# Altium footprint library FTP.PcbLib: 207 footprints (part 4 of 13)
Each footprint in its own frame and in the unit in brackets; x right, y up, seen from the top. Pads: shape width x height; smd on the part's side, far side on the other; paste and mask are expansions set on the pad; w line width, h text height; cw(c..) or ccw(c..) is an arc to the next point about the centre after c.
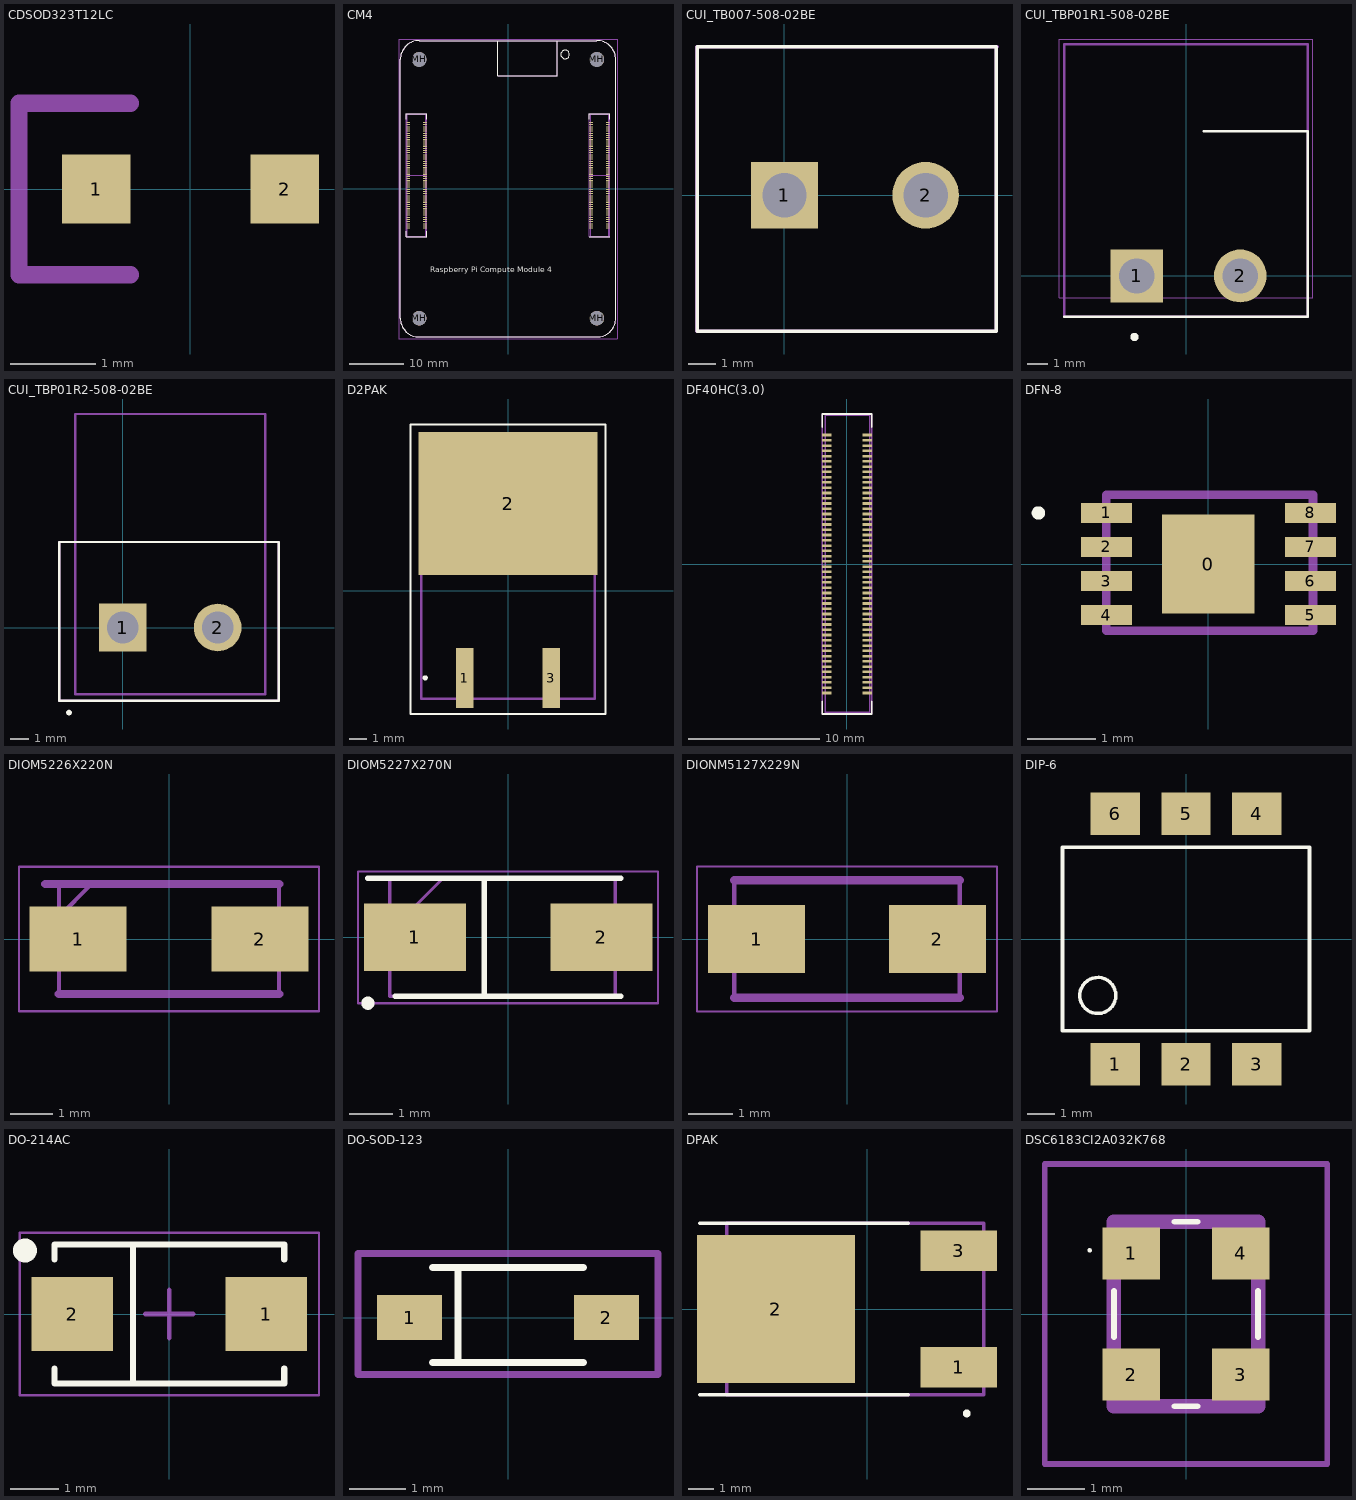
[diagram p3: the footprints below, top view; thin cyan lines are the x and y axes]

## CDSOD323T12LC [mil]
pads (2):
  rect 31.5x31.5 smd: 1(-43.31,0) 2(43.31,0)
Assembly Bottom:
  lines w7.87: -27.56,-39.37 -78.74,-39.37 -78.74,39.37 -27.56,39.37
3D body "CDSOD323-T12LC.stp": height 48.82, standoff 0, extent -55.91,-25.59 55.91,25.59

## CM4 [mm]
pads (204):
  rect 0.7x0.2 smd: 1(18.5,-7.3) 2(15.42,-7.3) 3(18.5,-6.9) 4(15.42,-6.9) 5(18.5,-6.5) 6(15.42,-6.5) 7(18.5,-6.1) 8(15.42,-6.1) 9(18.5,-5.7) 10(15.42,-5.7) 11(18.5,-5.3) 12(15.42,-5.3) 13(18.5,-4.9) 14(15.42,-4.9) 15(18.5,-4.5) 16(15.42,-4.5) 17(18.5,-4.1) 18(15.42,-4.1) 19(18.5,-3.7) 20(15.42,-3.7) 21(18.5,-3.3) 22(15.42,-3.3) 23(18.5,-2.9) 24(15.42,-2.9) 25(18.5,-2.5) 26(15.42,-2.5) 27(18.5,-2.1) 28(15.42,-2.1) 29(18.5,-1.7) 30(15.42,-1.7) 31(18.5,-1.3) 32(15.42,-1.3) 33(18.5,-0.9) 34(15.42,-0.9) 35(18.5,-0.5) 36(15.42,-0.5) 37(18.5,-0.1) 38(15.42,-0.1) 39(18.5,0.3) 40(15.42,0.3) 41(18.5,0.7) 42(15.42,0.7) 43(18.5,1.1) 44(15.42,1.1) 45(18.5,1.5) 46(15.42,1.5) 47(18.5,1.9) 48(15.42,1.9) 49(18.5,2.3) 50(15.42,2.3) 51(18.5,2.7) 52(15.42,2.7) 53(18.5,3.1) 54(15.42,3.1) 55(18.5,3.5) 56(15.42,3.5) 57(18.5,3.9) 58(15.42,3.9) 59(18.5,4.3) 60(15.42,4.3) 61(18.5,4.7) 62(15.42,4.7) 63(18.5,5.1) 64(15.42,5.1) 65(18.5,5.5) 66(15.42,5.5) 67(18.5,5.9) 68(15.42,5.9) 69(18.5,6.3) 70(15.42,6.3) 71(18.5,6.7) 72(15.42,6.7) 73(18.5,7.1) 74(15.42,7.1) 75(18.5,7.5) 76(15.42,7.5) 77(18.5,7.9) 78(15.42,7.9) 79(18.5,8.3) 80(15.42,8.3) 81(18.5,8.7) 82(15.42,8.7) 83(18.5,9.1) 84(15.42,9.1) 85(18.5,9.5) 86(15.42,9.5) 87(18.5,9.9) 88(15.42,9.9) 89(18.5,10.3) 90(15.42,10.3) 91(18.5,10.7) 92(15.42,10.7) 93(18.5,11.1) 94(15.42,11.1) 95(18.5,11.5) 96(15.42,11.5) 97(18.5,11.9) 98(15.42,11.9) 99(18.5,12.3) 100(15.42,12.3) 101(-15.42,-7.3) 102(-18.5,-7.3) 103(-15.42,-6.9) 104(-18.5,-6.9) 105(-15.42,-6.5) 106(-18.5,-6.5) 107(-15.42,-6.1) 108(-18.5,-6.1) 109(-15.42,-5.7) 110(-18.5,-5.7) 111(-15.42,-5.3) 112(-18.5,-5.3) 113(-15.42,-4.9) 114(-18.5,-4.9) 115(-15.42,-4.5) 116(-18.5,-4.5) 117(-15.42,-4.1) 118(-18.5,-4.1) 119(-15.42,-3.7) 120(-18.5,-3.7) 121(-15.42,-3.3) 122(-18.5,-3.3) 123(-15.42,-2.9) 124(-18.5,-2.9) 125(-15.42,-2.5) 126(-18.5,-2.5) 127(-15.42,-2.1) 128(-18.5,-2.1) 129(-15.42,-1.7) 130(-18.5,-1.7) 131(-15.42,-1.3) 132(-18.5,-1.3) 133(-15.42,-0.9) 134(-18.5,-0.9) 135(-15.42,-0.5) 136(-18.5,-0.5) 137(-15.42,-0.1) 138(-18.5,-0.1) 139(-15.42,0.3) 140(-18.5,0.3) 141(-15.42,0.7) 142(-18.5,0.7) 143(-15.42,1.1) 144(-18.5,1.1) 145(-15.42,1.5) 146(-18.5,1.5) 147(-15.42,1.9) 148(-18.5,1.9) 149(-15.42,2.3) 150(-18.5,2.3) 151(-15.42,2.7) 152(-18.5,2.7) 153(-15.42,3.1) 154(-18.5,3.1) 155(-15.42,3.5) 156(-18.5,3.5) 157(-15.42,3.9) 158(-18.5,3.9) 159(-15.42,4.3) 160(-18.5,4.3) 161(-15.42,4.7) 162(-18.5,4.7) 163(-15.42,5.1) 164(-18.5,5.1) 165(-15.42,5.5) 166(-18.5,5.5) 167(-15.42,5.9) 168(-18.5,5.9) 169(-15.42,6.3) 170(-18.5,6.3) 171(-15.42,6.7) 172(-18.5,6.7) 173(-15.42,7.1) 174(-18.5,7.1) 175(-15.42,7.5) 176(-18.5,7.5) 177(-15.42,7.9) 178(-18.5,7.9) 179(-15.42,8.3) 180(-18.5,8.3) 181(-15.42,8.7) 182(-18.5,8.7) 183(-15.42,9.1) 184(-18.5,9.1) 185(-15.42,9.5) 186(-18.5,9.5) 187(-15.42,9.9) 188(-18.5,9.9) 189(-15.42,10.3) 190(-18.5,10.3) 191(-15.42,10.7) 192(-18.5,10.7) 193(-15.42,11.1) 194(-18.5,11.1) 195(-15.42,11.5) 196(-18.5,11.5) 197(-15.42,11.9) 198(-18.5,11.9) 199(-15.42,12.3) 200(-18.5,12.3)
  round 2.7 hole 2.7 paste-2539.97 mask+1.7: MH(-16.5,-24) MH(-16.5,24) MH(16.5,-24) MH(16.5,24)
Top Overlay:
  circle w0.127: c10.6,24.933 r0.8
  lines w0.127: -18.85,-7.9 -18.85,-8.9 -15.07,-8.9 -15.07,-7.9 ; -18.85,12.9 -18.85,13.9 -15.07,13.9 -15.07,12.9 ; -1.9,27.5 -1.9,21 9.1,21 9.1,27.5 ; 15.07,-8.9 18.85,-8.9 ; 15.07,12.9 15.07,13.9 18.85,13.9 18.85,12.9 ; -20,-24 ccw(c-16.5,-24) -16.5,-27.5 16.5,-27.5 ccw(c16.5,-24) 20,-24 20,24 ccw(c16.5,24) 16.5,27.5 -16.5,27.5 ccw(c-16.5,24) -20,24 -20,-24
  text "." at 20.9,-7.4 h0.76
  text "Raspberry Pi Compute Module 4" at -14.446,-15.513 h1
3D Body Top:
  lines w0.12: -18.85,-8.9 -15.07,-8.9 ; -18.85,-8.9 -15.07,-8.9 ; -18.85,-8.9 -18.85,13.9 ; -18.85,-8.9 -18.85,13.9 ; -18.85,13.9 -15.07,13.9 ; -18.85,13.9 -15.07,13.9 ; -15.07,-8.9 -15.07,13.9 ; -15.07,-8.9 -15.07,13.9 ; 15.07,-8.9 18.85,-8.9 ; 15.07,-8.9 18.85,-8.9 ; 15.07,-8.9 15.07,13.9 ; 15.07,-8.9 15.07,13.9 ; 15.07,13.9 18.85,13.9 ; 15.07,13.9 18.85,13.9 ; 18.85,-8.9 18.85,13.9 ; 18.85,-8.9 18.85,13.9 ; -18.83,2.5 -15.05,2.5 -18.83,2.5 ; 15.07,2.5 18.85,2.5 15.07,2.5
  text "CAM1" at -16.9,0.749 h0.7
  text "DSI0" at -16.9,6.949 h0.7
  text "USB" at -16.9,-4.134 h0.7
  text "TV" at -17,-2.751 h0.7
  text "HDMI0" at -18,10.375 h0.7
  text "CAM0" at -18,0.783 h0.7
  text "DS1" at -17.5,13.049 h0.7
  text "HDMI1" at -18.1,5.958 h0.7
  text "PCIe" at -18,-3.051 h0.7
  text "3V3" at 15.8,8.625 h0.7
  text "1V8" at 15.8,11.225 h0.7
  text "GPIO" at 16.5,0.625 h0.7
  text "5V" at 17,9.9 h0.7
  text "SD" at 16.4,6.991 h0.7
  text "ETH" at 16.5,-4.751 h0.7
Mechanical 13:
  lines w0.127: -20,-24 ccw(c-16.5,-24) -16.5,-27.5 16.5,-27.5 ccw(c16.5,-24) 20,-24 20,24 ccw(c16.5,24) 16.5,27.5 -16.5,27.5 ccw(c-16.5,24) -20,24 -20,-24 ; -18.69,-8.785 -18.69,13.815 -15.31,13.815 -15.31,-8.785 -18.69,-8.785 ; 15.31,-8.785 15.31,13.815 18.69,13.815 18.69,-8.785 15.31,-8.785
Mechanical 15:
  lines w0.127: -20.316,-27.873 20.3,-27.873 20.3,27.8 -20.316,27.8 -20.316,-27.873 ; -18.85,-8.9 -18.85,13.9 -15.07,13.9 -15.07,-8.9 -18.85,-8.9 ; 15.07,-8.9 15.07,13.9 18.85,13.9 18.85,-8.9 15.07,-8.9
  text "+" at -0.507,-0.753 h1.5
Mechanical 16:
  lines w0.127: -1.9,27.5 -1.9,21 9.1,21 9.1,27.5
  text "Wireless / Cutout" at -1.532,22.9 h0.9
3D body "DF40HC(3.0)-100DS-0.4V.stp": height 2.9, standoff 0, extent 15.31,-8.785 18.69,13.815
3D body "DF40HC(3.0)-100DS-0.4V.stp": height 2.9, standoff 0, extent -18.69,-8.785 -15.31,13.815
3D body "CM4Lite-step.STEP": height 6.65, standoff 1.87, extent -19.95,-27.5 20.05,27.5

## CUI_TB007-508-02BE [mm]
pads (2):
  rect 2.4x2.4 hole 1.6: 1(0,0)
  round 2.4 hole 1.6: 2(5.08,0)
Top Overlay:
  lines w0.127: -3.14,-4.9 -3.14,5.35 7.62,5.35 7.62,-4.9 -3.14,-4.9
Mechanical 13:
  lines w0.127: -3.15,-4.9 -3.15,5.35 7.62,5.35 7.62,-4.9 -3.15,-4.9
Mechanical 15:
  lines w0.05: -3.14,5.35 -3.14,-4.9 7.65,-4.9 7.65,5.35
  lines w0.127: -3.14,5.35 7.65,5.35
3D body "CUI_DEVICES_TB007-508-02BE.step": height 14, standoff -3.7, extent -3.14,-4.9 7.62,5.35

## CUI_TBP01R1-508-02BE [mm]
pads (2):
  rect 2.55x2.55 hole 1.7: 1(-2.4,0)
  round 2.55 hole 1.7: 2(2.6,0)
Top Overlay:
  circle w0.2: c-2.512,-2.95 r0.1
  lines w0.127: -5.903,-1.975 5.858,-1.975 5.858,7 0.85,7
Mechanical 13:
  lines w0.127: -5.903,-1.975 5.858,-1.975 5.858,11.2 -5.903,11.2 -5.903,-1.975
Mechanical 15:
  lines w0.05: -6.152,-1.05 -6.152,11.45 6.108,11.45 6.108,-1.05 -6.152,-1.05
3D body "Assem1.STEP": height 15.08, standoff -3.92, extent -5.813,-1.932 5.947,20.732

## CUI_TBP01R2-508-02BE [mm]
pads (2):
  rect 2.55x2.55 hole 1.7: 1(0,0)
  round 2.55 hole 1.7: 2(5.08,0)
Top Overlay:
  circle w0.152: c-2.875,-4.55 r0.076
  lines w0.127: -3.405,-3.925 8.355,-3.925 8.355,4.575 -3.405,4.575 -3.405,-3.925
Mechanical 13:
  lines w0.127: -2.535,-3.575 7.625,-3.575 7.625,11.425 -2.535,11.425 -2.535,-3.575
Mechanical 15:
  lines w0.127: -3.405,-3.925 8.355,-3.925 8.355,4.575 -3.405,4.575 -3.405,-3.925
3D body "CUI_DEVICES_TBP01P1-508-02BE.step": height 20.5, standoff 2.5, extent -2.535,-3.575 7.625,11.425
3D body "CUI_DEVICES_TBP01R2-508-02BE.step": height 12.1, standoff -3.9, extent -3.405,-3.925 8.355,4.575

## D2PAK [mm]
pads (3):
  rect 1.016x3.504 smd mask+0.07: 1(-2.54,-5.106) 3(2.54,-5.106)
  rect 10.49x8.38 smd mask+0.07: 2(0,5.106)
Top Overlay:
  circle w0.152: c-4.85,-5.1 r0.076
  lines w0.127: -5.7,-7.214 -5.7,9.728 5.7,9.728 5.7,-7.214 -5.7,-7.214
Mechanical 15:
  lines w0.127: -5.08,0.9 -5.08,-6.316 5.08,-6.316 5.08,0.9
3D body "User Library-DPAK.step": height 4.98, standoff -0.03, extent -5.08,-6.316 5.08,8.948

## DF40HC(3.0) [mm]
pads (100):
  rect 0.7x0.2 smd: 1(1.54,-9.8) 2(-1.54,-9.8) 3(1.54,-9.4) 4(-1.54,-9.4) 5(1.54,-9) 6(-1.54,-9) 7(1.54,-8.6) 8(-1.54,-8.6) 9(1.54,-8.2) 10(-1.54,-8.2) 11(1.54,-7.8) 12(-1.54,-7.8) 13(1.54,-7.4) 14(-1.54,-7.4) 15(1.54,-7) 16(-1.54,-7) 17(1.54,-6.6) 18(-1.54,-6.6) 19(1.54,-6.2) 20(-1.54,-6.2) 21(1.54,-5.8) 22(-1.54,-5.8) 23(1.54,-5.4) 24(-1.54,-5.4) 25(1.54,-5) 26(-1.54,-5) 27(1.54,-4.6) 28(-1.54,-4.6) 29(1.54,-4.2) 30(-1.54,-4.2) 31(1.54,-3.8) 32(-1.54,-3.8) 33(1.54,-3.4) 34(-1.54,-3.4) 35(1.54,-3) 36(-1.54,-3) 37(1.54,-2.6) 38(-1.54,-2.6) 39(1.54,-2.2) 40(-1.54,-2.2) 41(1.54,-1.8) 42(-1.54,-1.8) 43(1.54,-1.4) 44(-1.54,-1.4) 45(1.54,-1) 46(-1.54,-1) 47(1.54,-0.6) 48(-1.54,-0.6) 49(1.54,-0.2) 50(-1.54,-0.2) 51(1.54,0.2) 52(-1.54,0.2) 53(1.54,0.6) 54(-1.54,0.6) 55(1.54,1) 56(-1.54,1) 57(1.54,1.4) 58(-1.54,1.4) 59(1.54,1.8) 60(-1.54,1.8) 61(1.54,2.2) 62(-1.54,2.2) 63(1.54,2.6) 64(-1.54,2.6) 65(1.54,3) 66(-1.54,3) 67(1.54,3.4) 68(-1.54,3.4) 69(1.54,3.8) 70(-1.54,3.8) 71(1.54,4.2) 72(-1.54,4.2) 73(1.54,4.6) 74(-1.54,4.6) 75(1.54,5) 76(-1.54,5) 77(1.54,5.4) 78(-1.54,5.4) 79(1.54,5.8) 80(-1.54,5.8) 81(1.54,6.2) 82(-1.54,6.2) 83(1.54,6.6) 84(-1.54,6.6) 85(1.54,7) 86(-1.54,7) 87(1.54,7.4) 88(-1.54,7.4) 89(1.54,7.8) 90(-1.54,7.8) 91(1.54,8.2) 92(-1.54,8.2) 93(1.54,8.6) 94(-1.54,8.6) 95(1.54,9) 96(-1.54,9) 97(1.54,9.4) 98(-1.54,9.4) 99(1.54,9.8) 100(-1.54,9.8)
Top Overlay:
  lines w0.127: -1.89,-10.443 -1.89,-11.4 1.89,-11.4 1.89,-10.443 ; -1.89,10.4 -1.89,11.4 1.89,11.4 1.89,10.4
  text "." at 2.774,-9.863 h0.76
Mechanical 13:
  lines w0.127: -1.65,-11.285 -1.65,11.315 1.73,11.315 1.73,-11.285 -1.65,-11.285
Mechanical 15:
  lines w0.127: -1.89,-11.4 1.89,-11.4 ; -1.89,-11.4 1.89,-11.4 ; -1.89,-11.4 -1.89,11.4 ; -1.89,-11.4 -1.89,11.4 ; -1.89,11.4 1.89,11.4 ; -1.89,11.4 1.89,11.4 ; 1.89,-11.4 1.89,11.4 ; 1.89,-11.4 1.89,11.4
  text "+" at -0.501,-0.754 h1.5
3D body "DF40HC(3.0)-100DS-0.4V.stp": height 2.9, standoff 0, extent -1.65,-11.285 1.73,11.315

## DFN-8 [mm]
pads (9):
  rect 1.36x1.46 smd mask+0.05: 0(0,0)
  rect 0.75x0.3 smd mask+0.05: 1(-1.5,0.75) 2(-1.5,0.25) 3(-1.5,-0.25) 4(-1.5,-0.75) 5(1.5,-0.75) 6(1.5,-0.25) 7(1.5,0.25) 8(1.5,0.75)
Top Overlay:
  circle w0.127: c-2.5,0.75 r0.035
Mechanical 15:
  lines w0.127: -1.502,-0.981 -1.502,1.019 1.538,1.019 1.538,-0.981 -1.502,-0.981
3D body "User Library-DFN-8-2.step": height 0.89, standoff -0.01, extent -1.502,-0.981 1.538,1.019

## DIOM5226X220N [mm]
pads (2):
  rect 2.3x1.55 smd: 1(-2.15,0) 2(2.15,0)
3D Body Bottom:
  lines w0.2: -2.925,1.302 2.605,1.302 ; -2.605,-1.302 2.605,-1.302
Bottom Assembly:
  lines w0.05: -3.55,-1.71 3.55,-1.71 3.55,1.71 -3.55,1.71 -3.55,-1.71
  lines w0.1: -2.605,0.528 -1.83,1.302 ; -2.605,-1.302 2.605,-1.302 2.605,1.302 -2.605,1.302 -2.605,-1.302
3D body "DO-214AC.STEP": height 2.29, standoff -0.01, extent -2.51,-1.33 2.69,1.27

## DIOM5227X270N [mm]
pads (2):
  rect 2.35x1.55 smd: 1(-2.15,0) 2(2.15,0)
Top Overlay:
  circle w0.152: c-3.231,-1.521 r0.076
  lines w0.127: -3.231,1.362 2.6,1.362 ; -2.6,-1.362 2.6,-1.362 ; -0.553,-1.357 -0.553,1.325
Mechanical 15:
  lines w0.05: -3.46,-1.521 -3.46,1.516 3.457,1.516 3.457,-1.521 -3.46,-1.521
  lines w0.076: -2.727,0 -2.727,0.061 -2.727,0.136 -1.5,1.363 ; -2.727,-1.362 -2.727,1.363 2.473,1.363 2.473,-1.362 -2.727,-1.362
3D body "S1M.stp": height 2.7, standoff 0, extent -2.727,-1.362 2.473,1.363

## DIONM5127X229N [mm]
pads (2):
  rect 2.2x1.55 smd: 1(-2.05,0) 2(2.05,0)
Assembly Bottom:
  lines w0.05: -3.4,-1.645 3.4,-1.645 3.4,1.645 -3.4,1.645 -3.4,-1.645
  lines w0.1: -2.552,-1.332 2.552,-1.332 2.552,1.332 -2.552,1.332 -2.552,-1.332
3D Body Bottom:
  lines w0.2: -2.552,-1.332 2.552,-1.332 ; -2.552,1.332 2.552,1.332
3D body "SMAJ24CA-Q.stp": height 2.29, standoff 0, extent -2.552,-1.332 2.552,1.332

## DIP-6 [mm]
pads (6):
  rect 1.78x1.52 smd mask+0.05: 1(-2.54,-4.508) 2(0,-4.508) 3(2.54,-4.508) 4(2.54,4.508) 5(0,4.508) 6(-2.54,4.508)
Top Overlay:
  circle w0.127: c-3.175,-2.032 r0.648
  lines w0.127: -4.445,-3.3 4.445,-3.3 4.445,3.3 -4.445,3.3 -4.445,-3.3
  text "." at -4.699,-4.508 h1.52
3D body "User Library-N06C.step": height 3.82, standoff 0, extent -3.56,-4.94 3.56,4.94

## DO-214AC [mm] "Molded Diode, 2-Leads, Body 4,50x2,71mm, IPC Medium Density"
height 2.61
pads (2):
  rect 1.7x1.55 smd: 1(2.025,0) 2(-2.025,0)
Top Overlay:
  circle w0.25: c-3.013,1.325 r0.125
  lines w0.127: -2.4,-1.138 -2.4,-1.45 2.4,-1.45 2.4,-1.138 ; -2.4,1.138 -2.4,1.45 2.4,1.45 2.4,1.138 ; -0.762,-1.45 -0.762,1.45
Mechanical 15:
  lines w0.05: -3.125,-1.7 -3.125,1.7 3.125,1.7 3.125,-1.7 -3.125,-1.7
  lines w0.1: -0.5,0 0.5,0 ; 0,-0.5 0,0.5
3D body "DO-214AC SMA.step": height 2.4, standoff 0, extent -2.6,-1.3 2.6,1.3

## DO-SOD-123 [mm]
pads (2):
  rect 1.15x0.8 smd: 1(-1.75,0) 2(1.75,0)
Top Overlay:
  lines w0.127: -1.345,-0.8 1.345,-0.8 ; -1.345,0.889 1.345,0.889 ; -0.889,-0.8 -0.889,0.889
Mechanical 15:
  lines w0.125: -2.667,-1.016 -2.667,1.143 2.667,1.143 2.667,-1.016 -2.667,-1.016
3D body "MBR0530T1G.stp": height 1.35, standoff 0, extent -1.601,-0.8 2.109,0.8

## DPAK [mm]
pads (3):
  rect 3x1.6 smd: 1(3.59,-2.286) 3(3.59,2.286)
  rect 6.2x5.8 smd: 2(-3.59,0)
Top Overlay:
  circle w0.152: c3.9,-4.1 r0.076
  lines w0.127: -6.59,-3.365 1.615,-3.365 ; -6.59,3.365 1.615,3.365
Mechanical 15:
  lines w0.127: -5.526,-3.367 -5.526,3.367 4.574,3.367 4.574,-3.367 -5.526,-3.367
3D body "DPAK_TO-252AA.STEP": height 2.37, standoff -0.03, extent -5.526,-3.367 4.574,3.367

## DSC6183CI2A032K768 [mm]
pads (4):
  rect 1x0.9 smd: 1(-0.95,1.05) 2(-0.95,-1.05) 3(0.95,-1.05) 4(0.95,1.05)
Top Overlay:
  lines w0.038: -1.689,1.104 cw(c-1.67,1.104) -1.651,1.104 cw(c-1.67,1.104) -1.689,1.104
  lines w0.1: -1.25,-0.4 -1.25,0.4 ; -0.2,-1.6 0.2,-1.6 ; -0.2,1.6 0.2,1.6 ; 1.25,-0.4 1.25,0.4
Mechanical 15:
  lines w0.254: -1.25,-1.6 -1.25,1.6 1.25,1.6 1.25,-1.6 -1.25,-1.6
Mechanical 20:
  lines w0.1: -2.45,-2.6 -2.45,2.6 2.45,2.6 2.45,-2.6 -2.45,-2.6
3D body "DSC1001CE5-025.0000T.stp": height 1, standoff 0, extent -1.36,-1.6 1.36,1.6